# Altium schematic symbol library PLL.SchLib: 12 symbols
Pins are listed as number, name and electrical type; pins without a type are passive.

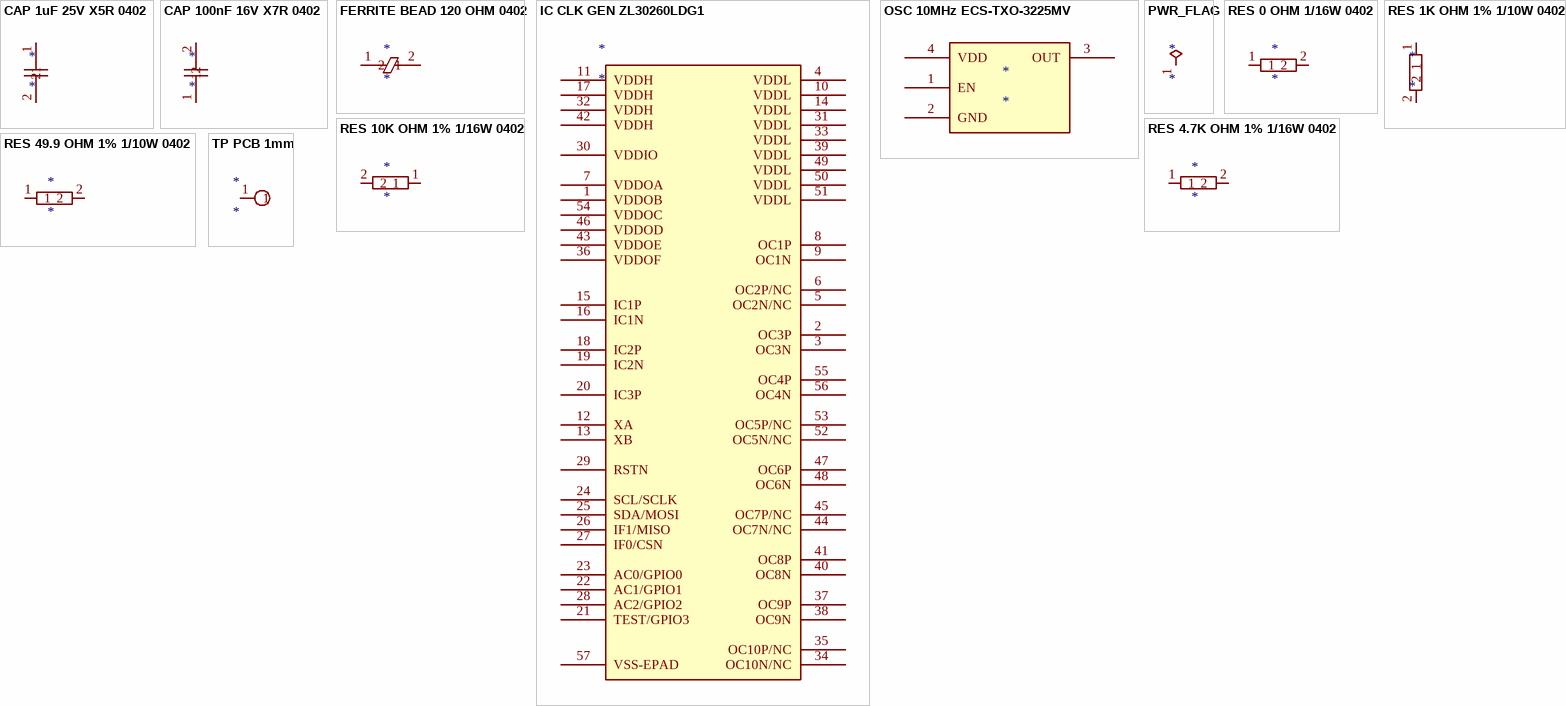
[diagram p0: symbols CAP 1uF 25V X5R 0402 to TP PCB 1mm]

## CAP 1uF 25V X5R 0402
designator *
pins: 1, 2

## CAP 100nF 16V X7R 0402
designator *
pins: 1, 2

## FERRITE BEAD 120 OHM 0402
designator *
pins: 1, 2

## IC CLK GEN ZL30260LDG1
designator *
pins: 1 VDDOB, 2 OC3P, 3 OC3N, 4 VDDL, 5 OC2N/NC, 6 OC2P/NC, 7 VDDOA, 8 OC1P, 9 OC1N, 10 VDDL, 11 VDDH, 12 XA, 13 XB, 14 VDDL, 15 IC1P, 16 IC1N, 17 VDDH, 18 IC2P, 19 IC2N, 20 IC3P, 21 TEST/GPIO3, 22 AC1/GPIO1, 23 AC0/GPIO0, 24 SCL/SCLK, 25 SDA/MOSI, 26 IF1/MISO, 27 IF0/CSN, 28 AC2/GPIO2, 29 RSTN, 30 VDDIO, 31 VDDL, 32 VDDH, 33 VDDL, 34 OC10N/NC, 35 OC10P/NC, 36 VDDOF, 37 OC9P, 38 OC9N, 39 VDDL, 40 OC8N, 41 OC8P, 42 VDDH, 43 VDDOE, 44 OC7N/NC, 45 OC7P/NC, 46 VDDOD, 47 OC6P, 48 OC6N, 49 VDDL, 50 VDDL, 51 VDDL, 52 OC5N/NC, 53 OC5P/NC, 54 VDDOC, 55 OC4P, 56 OC4N, 57 VSS-EPAD

## OSC 10MHz ECS-TXO-3225MV
designator *
pins: 1 EN, 2 GND, 3 OUT, 4 VDD

## PWR_FLAG
designator *  (graphical)
pins: 1

## RES 0 OHM 1/16W 0402
designator *
pins: 1, 2

## RES 1K OHM 1% 1/10W 0402
designator *
pins: 1, 2

## RES 4.7K OHM 1% 1/16W 0402
designator *
pins: 1, 2

## RES 10K OHM 1% 1/16W 0402
designator *
pins: 1, 2

## RES 49.9 OHM 1% 1/10W 0402
designator *
pins: 1, 2

## TP PCB 1mm
designator *
pins: 1